# Altium schematic symbol library turn-signal-indicator.SchLib: 8 symbols
Pins are listed as number, name and electrical type; pins without a type are passive.

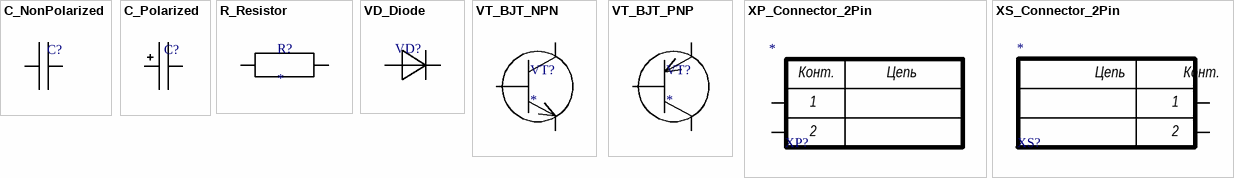
[diagram p0: symbols C_NonPolarized to XS_Connector_2Pin]

## C_NonPolarized
designator C?
Non-polarized capacitor
footprint C_KM5B_1000 (PCB footprint for KM5B capacitor)
footprint C_MLCC (Multilayer ceramic capacitor footprint)
pins: 1, 2

## C_Polarized
designator C?
Polarized capacitor
footprint C_KM50-35 (PCB footprint for KM50-35 capacitor)
pins: 1, 2

## R_Resistor
designator R?
Resistor; Value: *
footprint R_CF-25_C1-4 (PCB footprint for CF-25 / C1-4 resistor)
pins: 1, 2

## VD_Diode
designator VD?
Diode
footprint VD_KD30 (Diode footprint, KD-30 package)
pins: 1, 2

## VT_BJT_NPN
designator VT?
NPN bipolar junction transistor; Value: *
footprint VT_KT-13
pins: 1 Б, 2 К, 3 Э

## VT_BJT_PNP
designator VT?
PNP bipolar junction transistor; Value: *
footprint VT_KT-13
pins: 1 Б, 2 К, 3 Э

## XP_Connector_2Pin
designator XP?
2-pin connector (plug); Value: *
footprint X_2Pin_5.0mm (2-pin connector footprint)
pins: 1, 2
text: Конт.; Цепь

## XS_Connector_2Pin
designator XS?
2-pin connector (socket); Value: *
footprint X_2Pin_5.0mm (2-pin connector footprint)
pins: 1, 2
text: Цепь; Конт.